# EAGLE library part CON-USB-F-MICRO-B (library dp_devices.v6)
Micro USB 5P/F B Type SMT 1-MD05SMXXX-01
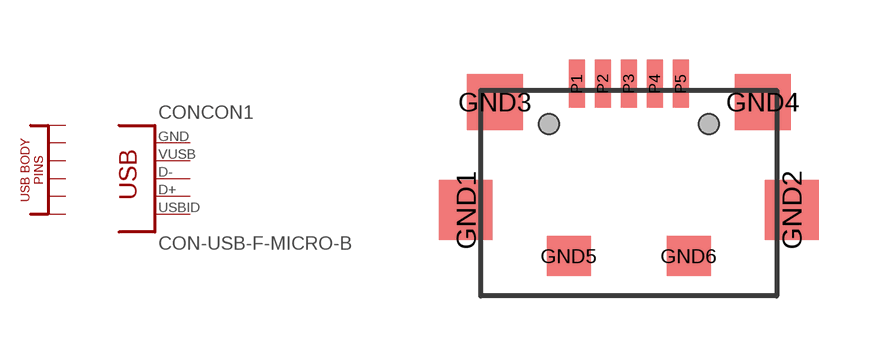
[diagram p175: symbol with the pads of CON_USB_MICRO-B-1-MD05SMXXX-01; footprint CON_USB_MICRO-B-1-MD05SMXXX-01]

Designator prefix CON; gates CON1=CONN_USB GPINS=USB_BODY_5P

## CON-USB-F-MICRO-B  [CON_USB_MICRO-B-1-MD05SMXXX-01]
GND1  GPINS:P$1  pas
GND2  GPINS:P$2  pas
GND3  GPINS:P$3  pas
GND4  GPINS:P$4  pas
GND5  GPINS:P$5  pas
GND6  GPINS:P$6  pas
P1  CON1:VUSB
P2  CON1:D-
P3  CON1:D+
P4  CON1:USBID
P5  CON1:GND

## Footprint CON_USB_MICRO-B-1-MD05SMXXX-01 (pad centres in mm)
1-MD05SNXXX-01 Micro USB 5P/F B Type SMT
smd 1.35 x 1.5: GND1 -4.075,0; GND2 4.075,0
smd 1.4 x 1.4: GND3 -3.35,2.7; GND4 3.35,2.7
smd 1.1 x 1: GND5 -1.5,-1.15; GND6 1.5,-1.15
smd 0.4 x 1.2: P1 -1.3,3.16; P2 -0.65,3.16; P3 0,3.16; P4 0.65,3.16; P5 1.3,3.16
hole 0.5 at -2,2.15
hole 0.5 at 2,2.15